# Altium footprint library aksima_footprint.PcbLib: 83 footprints (part 5 of 6)
Each footprint in its own frame and in the unit in brackets; x right, y up, seen from the top. Pads: shape width x height; smd on the part's side, far side on the other; paste and mask are expansions set on the pad; w line width, h text height; cw(c..) or ccw(c..) is an arc to the next point about the centre after c.
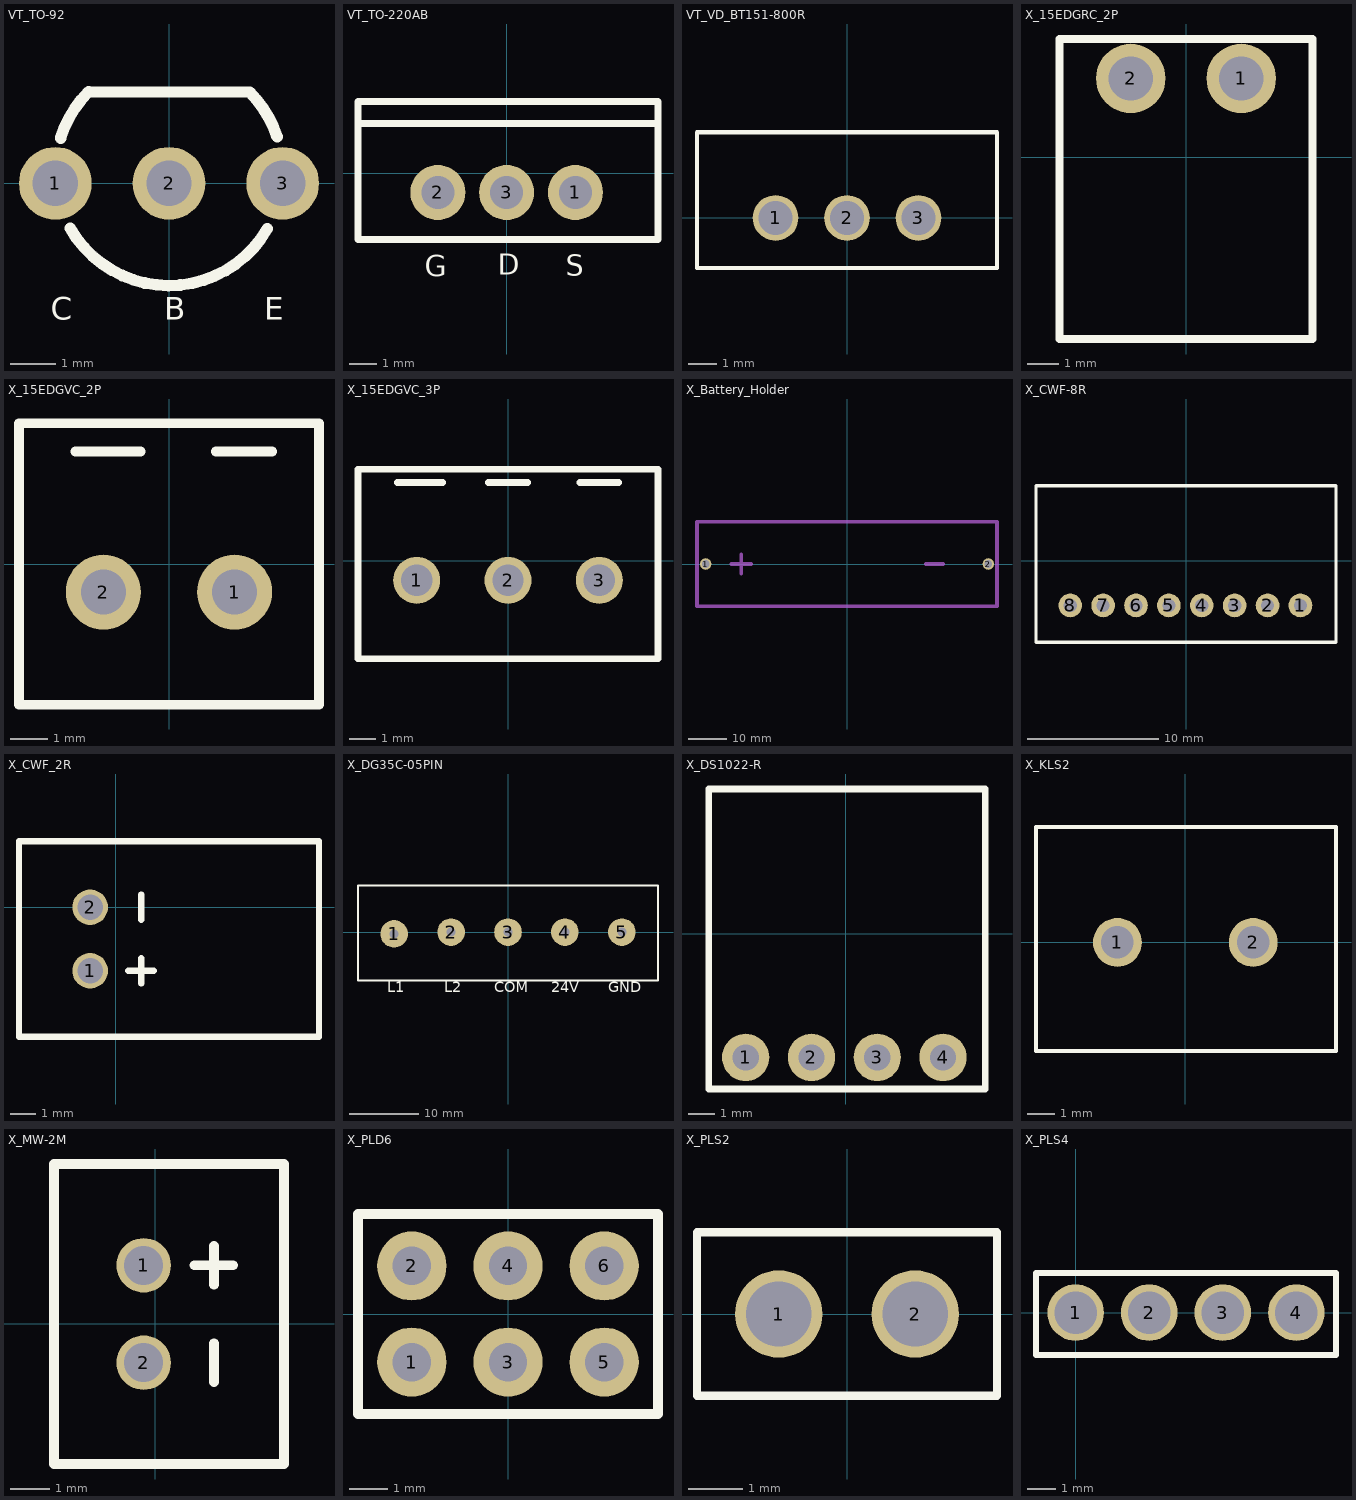
[diagram p4: the footprints below, top view; thin cyan lines are the x and y axes]

## VT_TO-92 [mm] "Transistor footprint, TO-92"
pads (3):
  round 1.6 hole 1: 1(-2.5,0) 2(0,0) 3(2.5,0)
Top Overlay:
  lines w0.254: -2.386,0.996 cw(c0,0.25) -1.768,2.018 1.768,1.999 ; -2.174,-0.985 ccw(c0,0.25) 2.163,-1.004 ; 1.777,2.008 cw(c0,0.25) 2.377,1.025
  text "E" at 2.1,-3 h0.5
  text "C" at -2.6,-3 h0.5
  text "B" at -0.1,-3 h0.5
3D body "TO-92_line_pin_2_5mm_pitch.stp": height 7.2, standoff -4, extent -2.75,-2.501 2.75,1.85

## VT_TO-220AB [mm] "Transistor footprint, TO-220AB"
pads (3):
  round 2 hole 1.2: 1(2.5,-0.7) 2(-2.5,-0.7) 3(0,-0.7)
Top Overlay:
  lines w0.254: -5.4,1.8 5.5,1.8 ; -5.4,-2.4 5.5,-2.4 5.5,2.6 -5.4,2.6 -5.4,-2.4
  text "S" at 2.154,-3.721 h0.75
  text "D" at -0.321,-3.696 h0.75
  text "G" at -2.971,-3.746 h0.75
3D body "TO-220AB.stp": height 21.58, standoff -9.73, extent -5.345,-2.25 5.345,2.56

## VT_VD_BT151-800R [mm] "Transistor footprint, VD BT151-800R"
pads (3):
  round 1.6 hole 1.2 unplated: 1(-2.5,0) 2(0,0) 3(2.5,0)
Top Overlay:
  lines w0.15: -5.25,-1.75 -5.25,3 5.25,3 5.25,-1.75 -5.25,-1.75
3D body "TO220ShortLegs.SLDPRT": height 20, standoff -3, extent -5.16,-1.55 5.16,2.75

## X_15EDGRC_2P [mm] "Connector footprint, 15EDGRC 2P"
pads (2):
  round 2.2 hole 1.4: 1(1.75,2.5) 2(-1.75,2.5)
Top Overlay:
  lines w0.254: -4,-5.75 4,-5.75 4,3.75 -4,3.75 -4,-5.75
3D body "15EDGRC-3.5-02P-14-00AH.STEP": height 7.2, standoff -3.4, extent -3.9,-5.5 3.9,3.7

## X_15EDGVC_2P [mm] "Connector footprint, 15EDGVC 2P"
pads (2):
  round 2 hole 1.2: 1(1.75,-0.75) 2(-1.75,-0.75)
Top Overlay:
  lines w0.254: -2.5,3 -0.75,3 ; 1.25,3 2.75,3 ; -4,-3.75 4,-3.75 4,3.75 -4,3.75 -4,-3.75
3D body "15EDGVC-3.5-02P-14-00AH.STEP": height 9.2, standoff -3.4, extent -3.9,-3.7 3.9,3.5

## X_15EDGVC_3P [mm] "Connector footprint, 15EDGVC 3P"
pads (3):
  round 1.8 hole 1.2: 1(-3.5,-0.75) 2(0,-0.75) 3(3.5,-0.75)
Top Overlay:
  lines w0.254: -4.25,3 -2.5,3 ; -0.75,3 0.75,3 ; 2.75,3 4.25,3 ; -5.75,-3.75 5.75,-3.75 5.75,3.5 -5.75,3.5 -5.75,-3.75
3D body "15EDGVC-3.5-03P-14-00AH.STEP": height 9.2, standoff -3.4, extent -5.65,-3.75 5.65,3.45

## X_Battery_Holder [mm] "Connector footprint, BATTERY CASE"
pads (2):
  round 3 hole 2: 1(-36.75,0) 2(36.75,0)
Bottom 3D Body:
  lines w1: -39,10.5 -39,-11 39,-11 39,11 -39,11 ; -30,0 -25,0 ; -27.5,-2.5 -27.5,2.5 ; 20.5,0 25,0
3D body "Porta_18650.STEP": height 21, standoff -4, extent -38.5,-10 38.5,10

## X_CWF-8R [mm] "8-position connector, CWF-8R"
pads (8):
  round 1.8 hole 1: 1(8.7,-3.4) 2(6.2,-3.4) 3(3.7,-3.4) 4(1.2,-3.4) 5(-1.3,-3.4) 6(-3.8,-3.4) 7(-6.3,-3.4) 8(-8.8,-3.4)
Top Overlay:
  lines w0.254: -11.4,-6.2 11.4,-6.2 11.4,5.7 -11.4,5.7 -11.4,-6.2
3D body "DS1069-8 CWF-8R.stp": height 5.75, standoff -3.5, extent -11.25,-6 11.25,5.5

## X_CWF_2R [mm] "Connector footprint, CWF 2R"
pads (2):
  round 1.4 hole 1: 1(-1,-2.5) 2(-1,0)
Top Overlay:
  lines w0.254: 0.5,-2.5 1.5,-2.5 ; 1,-3 1,-2 ; 1,-0.5 1,0.5 ; -3.8,-5.1 8,-5.1 8,2.6 -3.8,2.6 -3.8,-5.1
3D body "DS1069-2 CWF-2R.stp": height 5.75, standoff -3.5, extent -3.62,-5 7.88,2.5

## X_DG35C-05PIN [mm] "Connector footprint, DG35C-05PIN"
pads (5):
  round 4 hole 1.3: 1(-16.5,-0.25) 2(-8.25,0) 3(0,0) 4(8.25,0) 5(16.5,0)
Top Overlay:
  lines w0.254: -21.75,-7 21.75,-7 21.75,6.75 -21.75,6.75 -21.75,-7
  text "24V" at 6.254,-8.746 h1.52
  text "L1" at -17.496,-8.746 h1.52
  text "L2" at -9.246,-8.746 h1.52
  text "COM" at -1.996,-8.746 h1.52
  text "GND" at 14.504,-8.746 h1.52
3D body "DG35C-B-05P-1Y-00L (H).stp": height 15.1, standoff -3.55, extent -21.625,-6.85 21.625,6.75

## X_DS1022-R [mm] "Right-angle pin header, DS1022 series"
pads (4):
  round 1.8 hole 1: 1(-3.8,-4.7) 2(-1.3,-4.7) 3(1.2,-4.7) 4(3.7,-4.7)
Top Overlay:
  lines w0.254: -5.2,-5.9 5.3,-5.9 5.3,5.5 -5.2,5.5 -5.2,-5.9
3D body "DS1022-1x4RDF11.stp": height 2.54, standoff -3, extent -5.08,-5 5.08,5.35

## X_KLS2 [mm] "Connector footprint, KLS2"
pads (2):
  round 1.8 hole 1.2: 1(-2.5,0) 2(2.5,0)
Top Overlay:
  lines w0.15: -5.5,-4 5.55,-4 5.55,4.25 -5.5,4.25 -5.5,-4
3D body "KF301-5-2P_blue.step": height 10.46, standoff -3.7, extent -5.15,-3.7 5.2,3.9

## X_MW-2M [mm] "Connector footprint, MW-2M"
pads (2):
  round 1.4 hole 1: 1(-0.3,1.5) 2(-0.3,-1)
Top Overlay:
  lines w0.254: 1,1.5 2,1.5 ; 1.5,-1.5 1.5,-0.5 ; 1.5,1 1.5,2 ; -2.6,-3.6 3.3,-3.6 3.3,4.1 -2.6,4.1 -2.6,-3.6
3D body "2 Pin RMC Header.step": height 7, standoff -2.87, extent -2.5,-3.55 3.2,3.95

## X_PLD6 [mm] "6-position dual-row header, PLD-6"
pads (6):
  round 1.8 hole 1: 1(-2.5,-1.25) 2(-2.5,1.25) 3(0,-1.25) 4(0,1.25) 5(2.5,-1.25) 6(2.5,1.25)
Top Overlay:
  lines w0.254: -3.9,-2.6 3.9,-2.6 3.9,2.6 -3.9,2.6 -3.9,-2.6
3D body "PLD6.stp": height 8.54, standoff -3, extent -3.81,-2.54 3.81,2.54

## X_PLS2 [mm] "Connector footprint, PLS2"
pads (2):
  round 1.6 hole 1.2 unplated: 1(-1.25,0) 2(1.25,0)
Top Overlay:
  lines w0.15: -2.75,-1.5 -2.75,1.5 2.75,1.5 2.75,-1.5 -2.75,-1.5
3D body "PLS-2.step": height 9, standoff -2.5, extent -2.5,-1.202 2.55,1.202

## X_PLS4 [mm] "Connector footprint, PLS4"
pads (4):
  round 2 hole 1.5: 1(0,0) 2(2.6,0) 3(5.2,0) 4(7.8,0)
Top Overlay:
  lines w0.2: -1.4,-1.5 9.2,-1.5 9.2,1.4 -1.4,1.4 -1.4,-1.5
3D body "PLS-04.stp": height 8.2, standoff -3, extent -1.16,-1.298 9,1.2